# Altium footprint library Components - 26.10.26 - 19.05.PcbLib: 4 footprints
Each footprint in its own frame and in the unit in brackets; x right, y up, seen from the top. Pads: shape width x height; smd on the part's side, far side on the other; paste and mask are expansions set on the pad; w line width, h text height; cw(c..) or ccw(c..) is an arc to the next point about the centre after c.
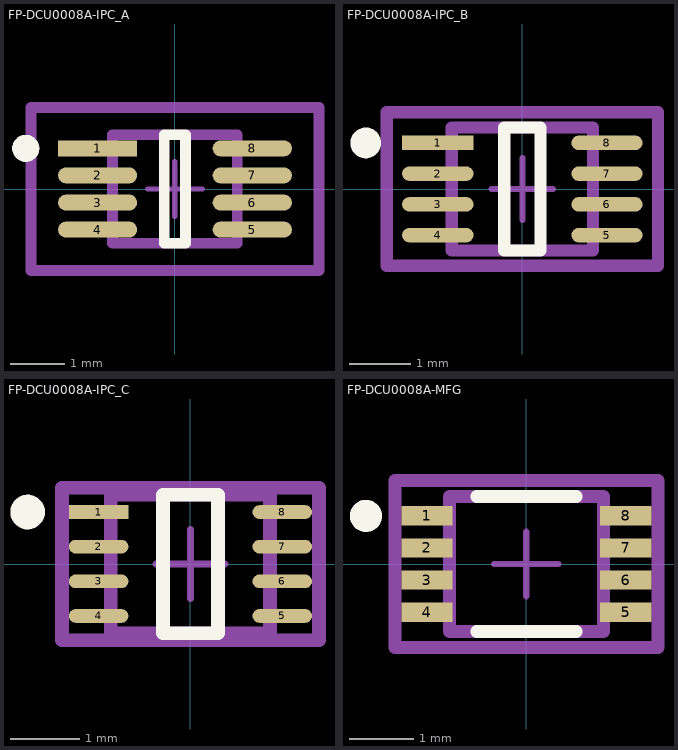
[diagram p0: the footprints below, top view; thin cyan lines are the x and y axes]

## FP-DCU0008A-IPC_A [mm]
pads (8):
  rect 1.46x0.297 smd paste+0 mask+0: 1(-1.426,0.75)
  rrect100% 1.46x0.297 smd paste+0 mask+0: 2(-1.426,0.25) 3(-1.426,-0.25) 4(-1.426,-0.75) 5(1.426,-0.75) 6(1.426,-0.25) 7(1.426,0.25) 8(1.426,0.75)
Top Overlay:
  circle w0.25: c-2.75,0.75 r0.125
  lines w0.2: -0.196,-1 0.196,-1 0.196,1 -0.196,1 -0.196,-1
Top Assembly:
  lines w0.2: -2.656,-1.5 2.656,-1.5 2.656,1.5 -2.656,1.5 -2.656,-1.5
  text ".Designator" at 0,0.188 h1
Top 3D Body:
  lines w0.2: -1.15,-1 1.15,-1 1.15,1 -1.15,1 -1.15,-1
Top Courtyard:
  lines w0.2: -2.656,-1.5 2.656,-1.5 2.656,1.5 -2.656,1.5 -2.656,-1.5
Top Component Center:
  lines w0.1: -0.5,0 0.5,0 ; 0,-0.5 0,0.5
3D body "IC_Texas_Instruments_SN74LVC3G34DCUR_eec.STEP": height 0.25, standoff 0, extent -2.656,-1.5 2.656,1.5

## FP-DCU0008A-IPC_B [mm]
pads (8):
  rect 1.16x0.237 smd paste+0 mask+0: 1(-1.376,0.75)
  rrect100% 1.16x0.237 smd paste+0 mask+0: 2(-1.376,0.25) 3(-1.376,-0.25) 4(-1.376,-0.75) 5(1.376,-0.75) 6(1.376,-0.25) 7(1.376,0.25) 8(1.376,0.75)
Top Overlay:
  circle w0.25: c-2.55,0.75 r0.125
  lines w0.2: -0.296,-1 0.296,-1 0.296,1 -0.296,1 -0.296,-1
Top Assembly:
  lines w0.2: -2.206,-1.25 2.206,-1.25 2.206,1.25 -2.206,1.25 -2.206,-1.25
  text ".Designator" at 0,0.188 h1
Top 3D Body:
  lines w0.2: -1.15,-1 1.15,-1 1.15,1 -1.15,1 -1.15,-1
Top Courtyard:
  lines w0.2: -2.206,-1.25 2.206,-1.25 2.206,1.25 -2.206,1.25 -2.206,-1.25
Top Component Center:
  lines w0.1: -0.5,0 0.5,0 ; 0,-0.5 0,0.5
3D body "IC_Texas_Instruments_SN74LVC3G34DCUR_eec.STEP": height 0.25, standoff 0, extent -2.206,-1.25 2.206,1.25

## FP-DCU0008A-IPC_C [mm]
pads (8):
  rect 0.86x0.197 smd paste+0 mask+0: 1(-1.326,0.75)
  rrect100% 0.86x0.197 smd paste+0 mask+0: 2(-1.326,0.25) 3(-1.326,-0.25) 4(-1.326,-0.75) 5(1.326,-0.75) 6(1.326,-0.25) 7(1.326,0.25) 8(1.326,0.75)
Top Overlay:
  circle w0.25: c-2.35,0.75 r0.125
  lines w0.2: -0.396,-1 0.396,-1 0.396,1 -0.396,1 -0.396,-1
Top Assembly:
  lines w0.2: -1.856,-1.1 1.856,-1.1 1.856,1.1 -1.856,1.1 -1.856,-1.1
  text ".Designator" at 0,0.188 h1
Top 3D Body:
  lines w0.2: -1.15,-1 1.15,-1 1.15,1 -1.15,1 -1.15,-1
Top Courtyard:
  lines w0.2: -1.856,-1.1 1.856,-1.1 1.856,1.1 -1.856,1.1 -1.856,-1.1
Top Component Center:
  lines w0.1: -0.5,0 0.5,0 ; 0,-0.5 0,0.5
3D body "IC_Texas_Instruments_SN74LVC3G34DCUR_eec.STEP": height 0.25, standoff 0, extent -1.856,-1.1 1.856,1.1

## FP-DCU0008A-MFG [mm]
pads (8):
  rect 0.8x0.3 smd paste-1000 mask+0: 1(-1.55,0.75) 2(-1.55,0.25) 3(-1.55,-0.25) 4(-1.55,-0.75) 5(1.55,-0.75) 6(1.55,-0.25) 7(1.55,0.25) 8(1.55,0.75)
Top Overlay:
  circle w0.25: c-2.5,0.75 r0.125
  lines w0.2: -0.775,-1.05 0.775,-1.05 ; -0.775,1.05 0.775,1.05
Top Paste:
  rectangle: -1.925,0.625 -1.175,0.875
  rectangle: -1.925,0.125 -1.175,0.375
  rectangle: -1.925,-0.375 -1.175,-0.125
  rectangle: -1.925,-0.875 -1.175,-0.625
  rectangle: 1.175,0.625 1.925,0.875
  rectangle: 1.175,0.125 1.925,0.375
  rectangle: 1.175,-0.375 1.925,-0.125
  rectangle: 1.175,-0.875 1.925,-0.625
Top Assembly:
  lines w0.2: -2.05,-1.3 2.05,-1.3 2.05,1.3 -2.05,1.3 -2.05,-1.3
  text ".Designator" at 0,0.188 h1
Top 3D Body:
  lines w0.2: -1.2,-1.05 1.2,-1.05 1.2,1.05 -1.2,1.05 -1.2,-1.05
Top Courtyard:
  lines w0.2: -2.05,-1.3 2.05,-1.3 2.05,1.3 -2.05,1.3 -2.05,-1.3
Top Component Center:
  lines w0.1: -0.5,0 0.5,0 ; 0,-0.5 0,0.5
3D body "IC_Texas_Instruments_SN74LVC3G34DCUR_eec.STEP": height 0.25, standoff 0, extent -2.05,-1.3 2.05,1.3